# Altium footprint library Library_PCB.PcbLib: 19 footprints (part 2 of 2)
Each footprint in its own frame and in the unit in brackets; x right, y up, seen from the top. Pads: shape width x height; smd on the part's side, far side on the other; paste and mask are expansions set on the pad; w line width, h text height; cw(c..) or ccw(c..) is an arc to the next point about the centre after c.
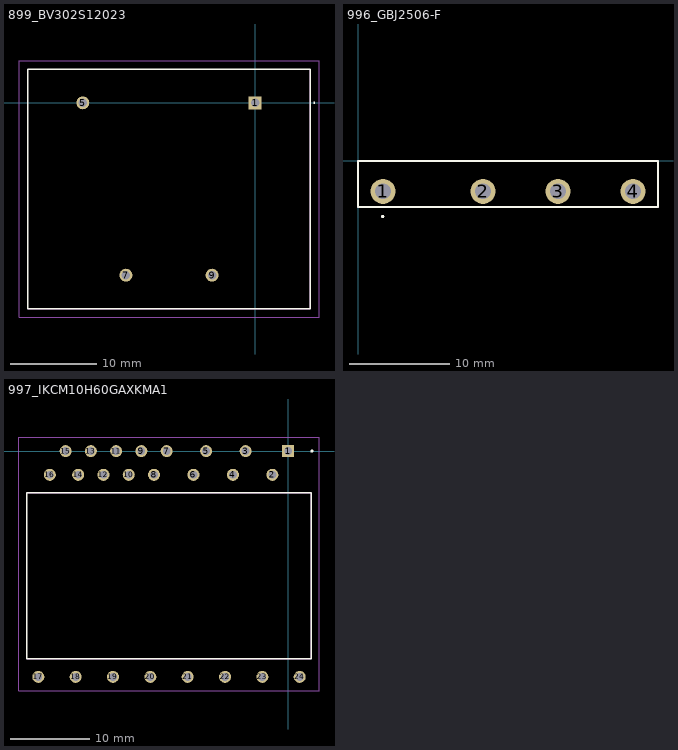
[diagram p1: the footprints below, top view; thin cyan lines are the x and y axes]

## 899_BV302S12023 [mm]
pads (4):
  rect 1.5x1.5 hole 1: 1(0,0)
  round 1.5 hole 1: 5(-20,0) 7(-15,-20) 9(-5,-20)
Top Overlay:
  lines w0.1: 6.8,0 cw(c6.85,0) 6.9,0 cw(c6.85,0) 6.8,0
  lines w0.2: -26.4,-23.9 -26.4,3.9 6.4,3.9 6.4,-23.9 -26.4,-23.9
Mechanical 15:
  lines w0.1: -26.4,-23.9 -26.4,3.9 6.4,3.9 6.4,-23.9 -26.4,-23.9
Mechanical 20:
  lines w0.1: -27.4,-24.9 -27.4,4.9 7.4,4.9 7.4,-24.9 -27.4,-24.9
3D body "BV302S12023.stp": height 29.79, standoff -4, extent -26.429,-23.876 6.362,3.912

## 996_GBJ2506-F [mm]
pads (4):
  round 2.5 hole 1.56: 1(2.5,-3.05) 2(12.5,-3.05) 3(20,-3.05) 4(27.5,-3.05)
Top Overlay:
  circle w0.2: c2.467,-5.567 r0.061
  lines w0.2: 0,-4.6 30,-4.6 30,0 0,0 0,-4.6
Mechanical 13:
  lines w0.2: 0,-4.6 0,0 30,0 30,-4.6 0,-4.6
3D body "GBJ2506-F.stp": height 25.23, standoff -13.07, extent -0.44,-4.69 29.86,0.11

## 997_IKCM10H60GAXKMA1 [mm]
pads (24):
  rect 1.524x1.524 hole 0.98: 1(0,0)
  round 1.524 hole 0.98: 2(-2,-3) 3(-5.4,0) 4(-7,-3) 5(-10.4,0) 6(-12,-3) 7(-15.4,0) 8(-17,-3) 9(-18.6,0) 10(-20.2,-3) 11(-21.8,0) 12(-23.4,-3) 13(-25,0) 14(-26.6,-3) 15(-28.2,0) 16(-30.2,-3) 17(-31.655,-28.6) 18(-26.925,-28.6) 19(-22.195,-28.6) 20(-17.465,-28.6) 21(-12.735,-28.6) 22(-8.005,-28.6) 23(-3.275,-28.6) 24(1.455,-28.6)
Top Overlay:
  lines w0.2: 2.9,0 ccw(c3,0) 3.1,0 ; 2.9,0 cw(c3,0) 3.1,0 ; 2.9,0 ccw(c3,0) 3.1,0 ; -33.1,-26.3 -33.1,-5.3 2.9,-5.3 2.9,-26.3 -33.1,-26.3
Mechanical 15:
  lines w0.1: -33.1,-26.3 -33.1,-5.3 2.9,-5.3 2.9,-26.3 -33.1,-26.3
Mechanical 20:
  lines w0.1: -34.1,-30.362 -34.1,1.762 3.9,1.762 3.9,-30.362 -34.1,-30.362
3D body "IKCM10H60GAXKMA1.stp": height 5.7, standoff -5, extent -33.079,-28.956 2.921,0.418